# Altium footprint library ReguladoresTransistores.PcbLib: 20 footprints (part 2 of 2)
Each footprint in its own frame and in the unit in brackets; x right, y up, seen from the top. Pads: shape width x height; smd on the part's side, far side on the other; paste and mask are expansions set on the pad; w line width, h text height; cw(c..) or ccw(c..) is an arc to the next point about the centre after c.
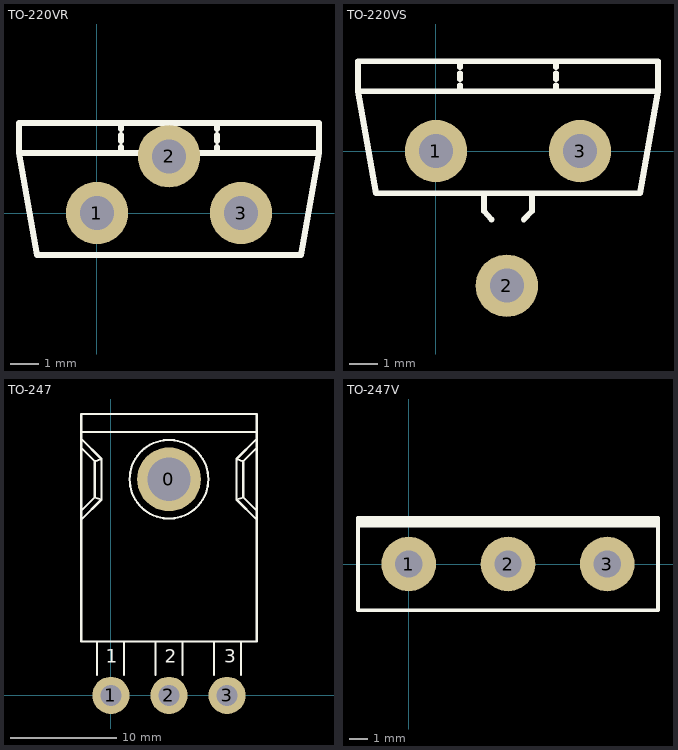
[diagram p1: the footprints below, top view; thin cyan lines are the x and y axes]

## TO-220VR [mm]
pads (3):
  round 2.2 hole 1.2: 1(0,0) 2(2.54,2) 3(5.08,0)
Top Overlay:
  lines w0.2: 0.847,2.117 0.847,2.328 ; 0.847,2.54 0.847,2.752 ; 0.847,2.963 0.847,3.175 ; 4.233,2.117 4.233,2.328 ; 4.233,2.54 4.233,2.752 ; 4.233,2.963 4.233,3.175 ; -2.752,2.117 -2.752,3.175 7.832,3.175 7.832,2.117 ; -2.752,2.117 -2.117,-1.482 7.197,-1.482 7.832,2.117 ; -2.752,2.117 7.832,2.117

## TO-220VS [mm]
pads (3):
  round 2.2 hole 1.2: 1(0,0) 2(2.5,-4.75) 3(5.08,0)
Top Overlay:
  lines w0.2: 0.847,2.117 0.847,2.328 ; 0.847,2.54 0.847,2.752 ; 0.847,2.963 0.847,3.175 ; 1.693,-1.482 1.693,-2.117 1.957,-2.416 ; 3.099,-2.416 3.387,-2.117 3.387,-1.482 ; 4.233,2.117 4.233,2.328 ; 4.233,2.54 4.233,2.752 ; 4.233,2.963 4.233,3.175 ; -2.752,2.117 7.832,2.117 ; -2.752,2.117 -2.117,-1.482 7.197,-1.482 7.832,2.117 ; -2.752,2.117 -2.752,3.175 7.832,3.175 7.832,2.117

## TO-247 [mm]
pads (4):
  round 6 hole 4.064: 0(5.461,20.32)
  round 3.5 hole 2: 1(0,0) 2(5.461,0) 3(10.922,0)
Top Overlay:
  circle w0.2: c5.461,20.32 r3.698
  lines w0.2: -2.794,16.51 -0.889,18.415 ; -2.794,17.357 -1.524,18.627 ; -2.794,23.283 -1.524,22.013 ; -2.794,24.13 -0.889,22.225 ; -2.794,24.765 13.716,24.765 ; -1.312,1.905 -1.312,5.08 ; 1.228,1.905 1.228,5.08 ; 4.191,1.905 4.191,5.08 ; 6.731,1.905 6.731,5.08 ; 9.694,1.905 9.694,5.08 ; 12.234,1.905 12.234,5.08 ; 13.716,16.51 11.811,18.415 ; 13.716,17.357 12.446,18.627 ; 13.716,23.283 12.446,22.013 ; 13.716,24.13 11.811,22.225 ; -1.524,18.627 -1.524,22.013 ; -1.524,18.627 -0.889,18.415 ; -1.524,22.013 -0.889,22.225 ; -0.889,18.415 -0.889,22.225 ; 11.811,18.415 11.811,22.225 ; 11.811,18.415 12.446,18.627 ; 11.811,22.225 12.446,22.013 ; 12.446,18.627 12.446,22.013 ; -2.794,5.08 13.716,5.08 13.716,26.458 -2.794,26.458 -2.794,5.08
  text "1" at -0.508,3.048 h1.27
  text "2" at 5.08,3.048 h1.27
  text "3" at 10.668,3.048 h1.27

## TO-247V [mm]
pads (3):
  round 3 hole 1.5: 1(0,0) 2(5.461,0) 3(10.922,0)
Top Overlay:
  lines w0.2: -2.794,2.117 13.716,2.117 ; -2.794,2.201 13.716,2.201 ; -2.794,2.328 13.716,2.328 ; -2.794,2.413 13.716,2.413 ; -2.794,-2.54 -2.794,2.54 13.716,2.54 13.716,-2.54 -2.794,-2.54